# Altium footprint library NTIR_Passives.PcbLib: 28 footprints (part 1 of 2)
Each footprint in its own frame and in the unit in brackets; x right, y up, seen from the top. Pads: shape width x height; smd on the part's side, far side on the other; paste and mask are expansions set on the pad; w line width, h text height; cw(c..) or ccw(c..) is an arc to the next point about the centre after c.
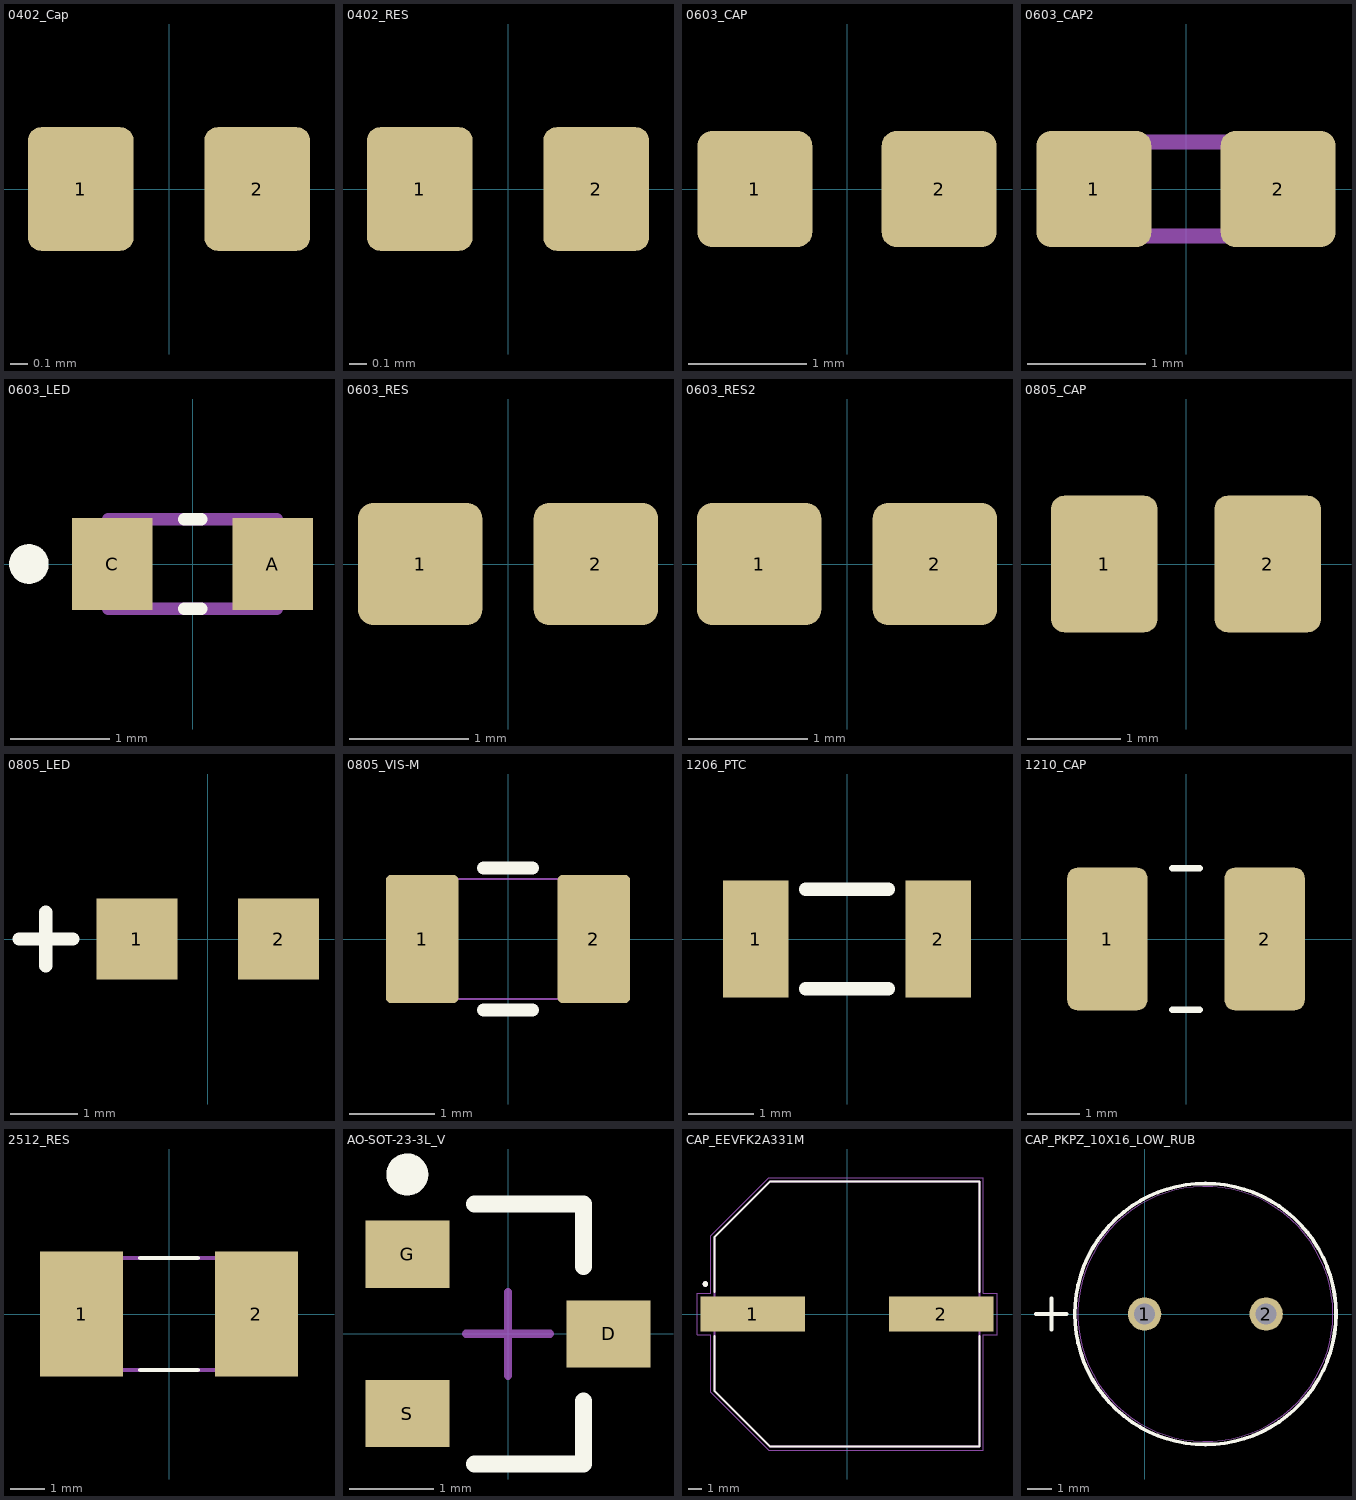
[diagram p0: the footprints below, top view; thin cyan lines are the x and y axes]

## 0402_Cap [mm]
pads (2):
  rrect25% 0.6x0.7 smd paste+0 mask+0.051: 1(-0.5,0) 2(0.5,0)
3D body "step_temp.STEP": height 0.55, standoff 0, extent -0.5,-0.25 0.5,0.25

## 0402_RES [mm]
pads (2):
  rrect25% 0.6x0.7 smd paste+0 mask+0.051: 1(-0.5,0) 2(0.5,0)
3D body "step_temp.STEP": height 0.4, standoff 0, extent -0.5,-0.25 0.5,0.25

## 0603_CAP [mm]
pads (2):
  rrect25% 0.972x0.981 smd mask+0.051: 1(-0.78,0) 2(0.78,0)
3D body "step_temp.STEP": height 0.9, standoff 0, extent -0.8,-0.4 0.8,0.4

## 0603_CAP2 [mm]
pads (2):
  rrect25% 0.972x0.981 smd mask+0.051: 1(-0.78,0) 2(0.78,0)
Top 3D Body:
  lines w0.127: -0.8,-0.4 -0.8,0.4 0.8,0.4 0.8,-0.4 -0.8,-0.4
3D body "step_temp.STEP": height 0.9, standoff 0, extent -0.8,-0.4 0.8,0.4

## 0603_LED [mm]
pads (2):
  rect 0.81x0.93 smd: A(0.81,0) C(-0.81,0)
Top Overlay:
  circle w0.2: c-1.651,0 r0.1
  lines w0.127: -0.085,-0.45 0.085,-0.45 ; -0.085,0.45 0.085,0.45
Mechanical 13:
  lines w0.127: -0.85,-0.45 0.85,-0.45 0.85,0.45 -0.85,0.45 -0.85,-0.45
3D body "KT-0603R--3DModel-STEP-269445.STEP": height 0.65, standoff 0, extent -0.8,-0.4 0.8,0.4

## 0603_RES [mm]
pads (2):
  rrect25% 1.04x1.02 smd mask+0.051: 1(-0.735,0) 2(0.735,0)
3D body "step_temp.STEP": height 0.55, standoff 0, extent -0.8,-0.4 0.8,0.4

## 0603_RES2 [mm]
pads (2):
  rrect25% 1.04x1.02 smd mask+0.051: 1(-0.735,0) 2(0.735,0)
3D body "step_temp.STEP": height 0.55, standoff 0, extent -0.8,-0.4 0.8,0.4

## 0805_CAP [mm]
pads (2):
  rrect25% 1.15x1.47 smd mask+0.051: 1(-0.88,0) 2(0.88,0)
3D body "step_temp.STEP": height 1.45, standoff 0, extent -1,-0.625 1,0.625

## 0805_LED [mm]
pads (2):
  rect 1.2x1.2 smd: 1(-1.05,0) 2(1.05,0)
Top Overlay:
  lines w0.2: -2.8,0 -2,0 ; -2.4,-0.4 -2.4,0.4
3D body: height 0.8, standoff 0, extent -1,-0.65 1,0.65

## 0805_VIS-M [mm]
pads (2):
  rrect15% 0.85x1.5 smd paste+0 mask+0.051: 1(-1.002,0) 2(1.002,0)
Top Overlay:
  lines w0.152: -0.283,-0.827 0.283,-0.827 ; -0.283,0.827 0.283,0.827
Mechanical 13:
  lines w0.025: -1.1,-0.7 -1.1,0.7 ; -1.1,-0.7 -0.6,-0.7 -0.6,0.7 -1.1,0.7 ; -1.1,-0.7 1.1,-0.7 ; -1.1,-0.7 -1.1,0.7 ; -1.1,0.7 1.1,0.7 ; 1.1,-0.7 0.6,-0.7 0.6,0.7 1.1,0.7 ; 1.1,-0.7 1.1,0.7 ; 1.1,-0.7 1.1,0.7
3D body "0805_VIS.step": height 0.84, standoff 0, extent -1.1,-0.7 1.1,0.7

## 1206_PTC [mm]
pads (2):
  rect 1x1.8 smd mask+0.051: 1(-1.4,0) 2(1.4,0)
Top Overlay:
  lines w0.203: -0.635,-0.762 0.635,-0.762 ; -0.635,0.762 0.635,0.762
3D body "step_temp.STEP": height 0.75, standoff 0, extent -1.6,-0.8 1.6,0.8

## 1210_CAP [mm]
pads (2):
  rrect25% 1.53x2.72 smd paste+0 mask+0.102: 1(-1.5,0) 2(1.5,0)
Top Overlay:
  lines w0.127: -0.26,-1.35 0.26,-1.35 ; -0.26,1.35 0.26,1.35
3D body "step_temp.STEP": height 2.7, standoff 0, extent -1.6,-1.25 1.6,1.25

## 2512_RES [mm]
pads (2):
  rect 2.45x3.7 smd mask+0.051: 1(-2.575,0) 2(2.575,0)
Top Overlay:
  lines w0.127: -0.85,-1.65 0.85,-1.65 ; -0.85,1.65 0.85,1.65
Mechanical 13:
  lines w0.127: -3.25,-1.65 -3.25,1.65 3.25,1.65 3.25,-1.65 -3.25,-1.65
3D body "step_temp.STEP": height 0.8, standoff 0, extent -3.15,-1.55 3.15,1.55

## AO-SOT-23-3L_V [mm] "SOT23, 3-Leads, Body 3.1x1.8mm, Pitch 0.95mm"
height 1.25
pads (3):
  rect 1x0.8 smd mask+0.051: D(1.2,0) G(-1.2,0.95) S(-1.2,-0.95)
Top Overlay:
  circle w0.25: c-1.2,1.9 r0.125
  lines w0.2: -0.4,-1.55 0.9,-1.55 0.9,-0.8 ; -0.4,1.55 0.9,1.55 0.9,0.8
Mechanical 15:
  lines w0.1: -0.5,0 0.5,0 ; 0,-0.5 0,0.5
3D body "AO3401A.STEP": height 1.25, standoff 0, extent -1.4,-1.45 1.4,1.45

## CAP_EEVFK2A331M [mm]
pads (2):
  rect 7.5x2.5 smd: 1(-6.75,0) 2(6.75,0)
Top Overlay:
  circle w0.2: c-10.15,2.15 r0.1
  lines w0.127: -9.5,-1.57 -9.5,-5.5 -5.5,-9.5 9.5,-9.5 9.5,-1.57 ; -9.5,1.57 -9.5,5.5 -5.5,9.5 9.5,9.5 9.5,1.57
Mechanical 13:
  circle w0.2: c-10.15,2.15 r0.1
  lines w0.127: -9.5,-5.5 -9.5,5.5 -5.5,9.5 9.5,9.5 9.5,-9.5 -5.5,-9.5 -9.5,-5.5
Mechanical 15:
  lines w0.05: -10.75,-1.5 -9.75,-1.5 -9.75,-5.625 -5.625,-9.75 9.75,-9.75 9.75,-1.5 10.75,-1.5 10.75,1.5 9.75,1.5 9.75,9.75 -5.625,9.75 -9.75,5.625 -9.75,1.5 -10.75,1.5 -10.75,-1.5
3D body "step_temp.STEP": height 16.5, standoff 0, extent -10.2,-9.5 10.2,9.5

## CAP_PKPZ_10X16_LOW_RUB [mil]
pads (2):
  round 54 hole 34 paste-27 mask+0: 1(0,0) 2(196.85,0)
Top Overlay:
  circle w6: c98.43,0 r211.5
  lines w6: -175.95,0 -125.95,0 ; -150.95,-25 -150.95,25
Mechanical 13:
  circle w1: c98.43,0 r206.5
3D body "CAP_PKPZ_10X16_LOW_RUB.step": height 689.61, standoff -172.01, extent -108.07,-206.02 305.88,206.02